# Altium integrated library power_lib.IntLib: 1 symbol
Pins are listed as number, name and electrical type; pins without a type are passive.

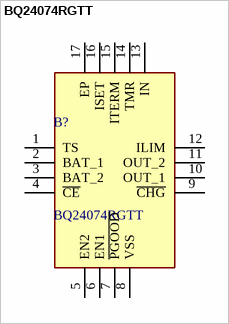
[diagram p0: symbol BQ24074RGTT]

## BQ24074RGTT
designator B?
USB-Friendly Li-Ion Battery Charger and Power-Path Management IC, 10.5V OVP; Manufacturer_Name: Texas Instruments; Geometry.Height: 1mm; Mouser Part Number: 595-BQ24074RGTT; Mouser Price/Stock: https://www.mouser.co.uk/ProductDetail/Texas-Instruments/BQ24074RGTT?qs=ZV%2Fxhq4oszp0gb4MsbpFYw%3D%3D; Manufacturer_Part_Number: BQ24074RGTT; Datasheet Link: http://www.ti.com/lit/gpn/bq24074
footprint QFN50P300X300X100-17N-D
pins: 1 TS, 2 BAT_1, 3 BAT_2, 4 ~{CE}, 5 EN2, 6 EN1, 7 ~{PGOOD}, 8 VSS, 9 ~{CHG}, 10 OUT_1, 11 OUT_2, 12 ILIM, 13 IN, 14 TMR, 15 ITERM, 16 ISET, 17 EP